# Altium footprint library 1.10-电容.PcbLib: 193 footprints (part 10 of 13)
Each footprint in its own frame and in the unit in brackets; x right, y up, seen from the top. Pads: shape width x height; smd on the part's side, far side on the other; paste and mask are expansions set on the pad; w line width, h text height; cw(c..) or ccw(c..) is an arc to the next point about the centre after c.
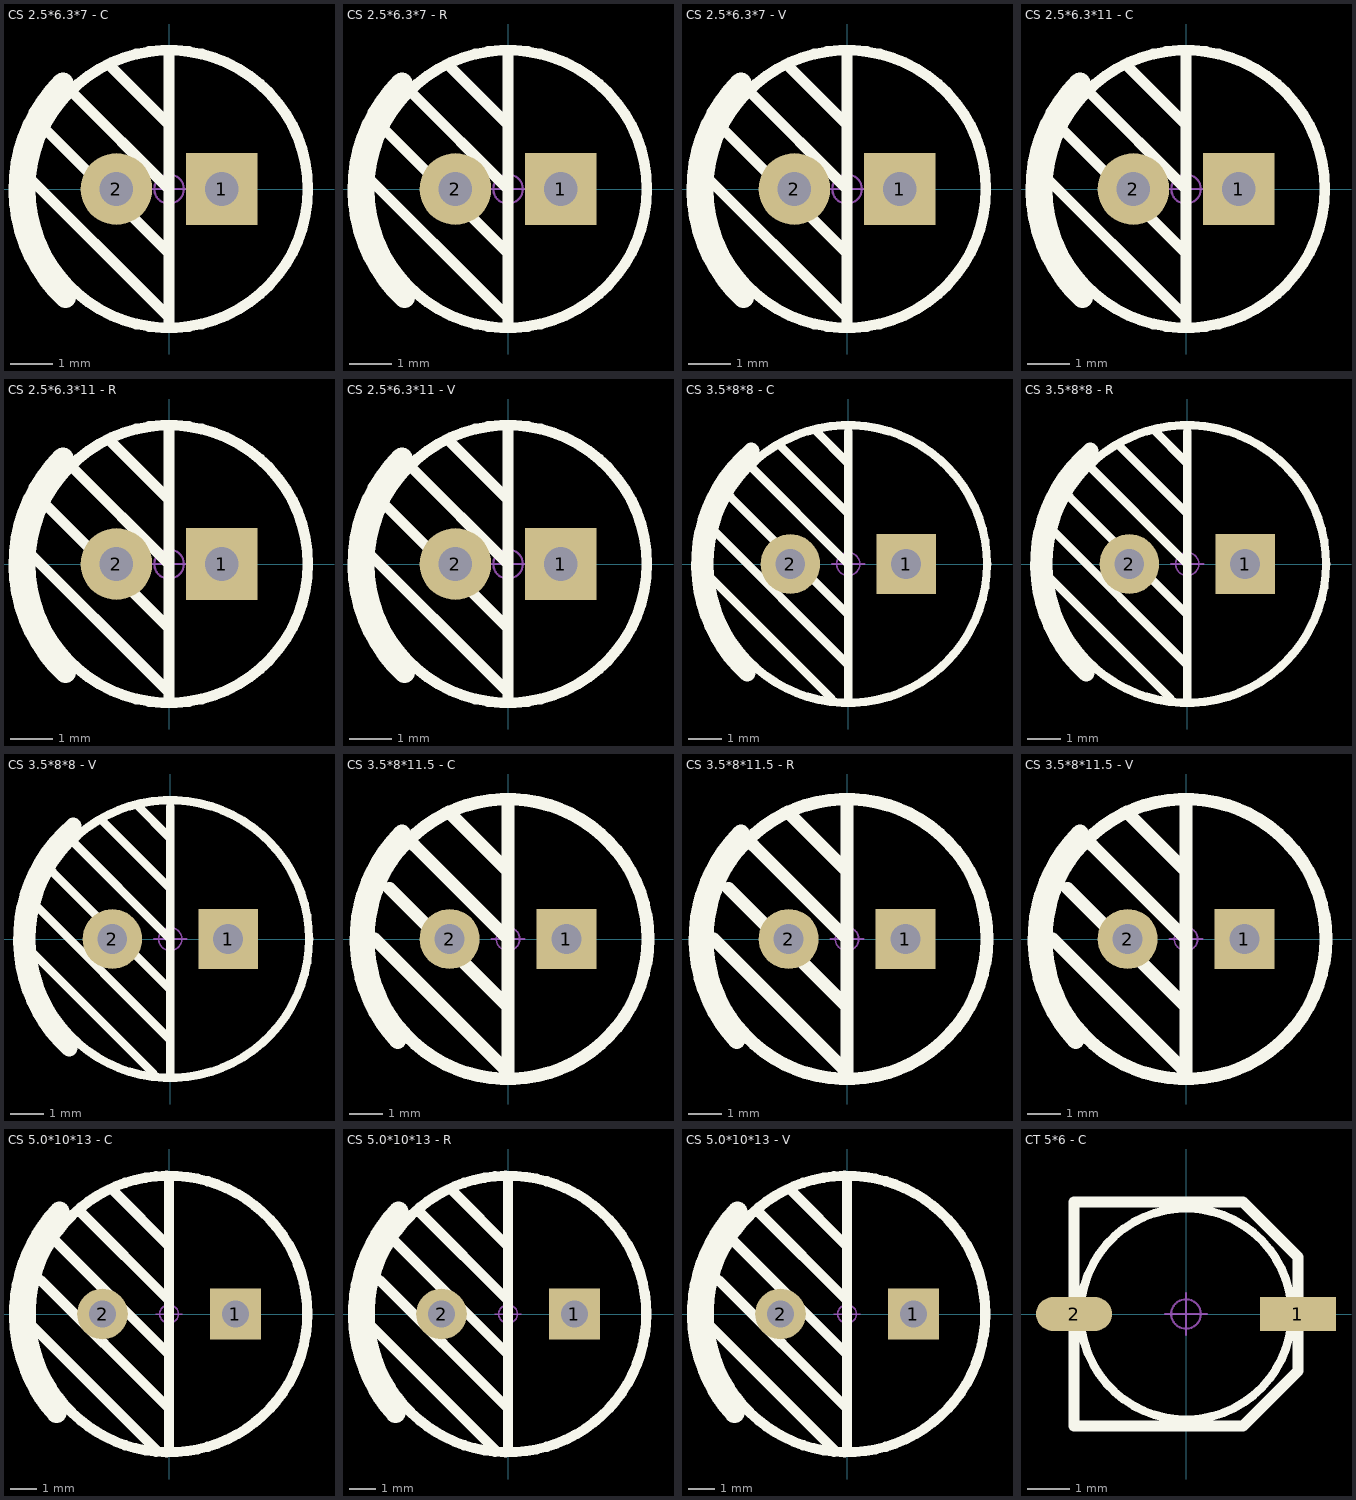
[diagram p9: the footprints below, top view; thin cyan lines are the x and y axes]

## CS 2.5*6.3*7 - C [mm] "脚距2.5mm , 直径6.3mm , 高7mm                淘宝ID:黄晶宝石"
pads (2):
  rect 1.7x1.7 hole 0.8: 1(1.25,0)
  round 1.7 hole 0.8: 2(-1.25,0)
Top Overlay:
  circle w0.254: c0,0 r3.3
  lines w0.254: -3.556,0.508 0,-3.048 ; -3.048,1.524 0,-1.524 ; -2.286,2.286 0,0 ; -1.397,2.921 0,1.524 ; 0,-3.15 0,3.15
  lines w0.504: -2.521,2.521 ccw(c0,0) -2.459,-2.582
Mechanical 15:
  circle w0.05: c0,0 r0.35
  lines w0.05: -0.5,0 0.5,0 ; 0,-0.5 0,0.5
3D body "CS 6.3X7.STEP": height 7.02, standoff -3.48, extent -3.15,-3.15 3.15,3.15

## CS 2.5*6.3*7 - R [mm] "脚距2.5mm , 直径6.3mm , 高7mm           淘宝ID:黄晶宝石"
pads (2):
  rect 1.7x1.7 hole 0.8: 1(1.25,0)
  round 1.7 hole 0.8: 2(-1.25,0)
Top Overlay:
  circle w0.254: c0,0 r3.3
  lines w0.254: -3.556,0.508 0,-3.048 ; -3.048,1.524 0,-1.524 ; -2.286,2.286 0,0 ; -1.397,2.921 0,1.524 ; 0,-3.15 0,3.15
  lines w0.504: -2.521,2.521 ccw(c0,0) -2.459,-2.582
Mechanical 15:
  circle w0.05: c0,0 r0.35
  lines w0.05: -0.5,0 0.5,0 ; 0,-0.5 0,0.5
3D body "CS 6.3X7.STEP": height 7.02, standoff -3.48, extent -3.15,-3.15 3.15,3.15

## CS 2.5*6.3*7 - V [mm] "脚距2.5mm , 直径6.3mm , 高7mm"
pads (2):
  rect 1.7x1.7 hole 0.8: 1(1.25,0)
  round 1.7 hole 0.8: 2(-1.25,0)
Top Overlay:
  circle w0.254: c0,0 r3.3
  lines w0.254: -3.556,0.508 0,-3.048 ; -3.048,1.524 0,-1.524 ; -2.286,2.286 0,0 ; -1.397,2.921 0,1.524 ; 0,-3.15 0,3.15
  lines w0.504: -2.521,2.521 ccw(c0,0) -2.459,-2.582
Mechanical 15:
  circle w0.05: c0,0 r0.35
  lines w0.05: -0.5,0 0.5,0 ; 0,-0.5 0,0.5
3D body "CS 6.3X7.STEP": height 7, standoff -3.5, extent -3.15,-3.15 3.15,3.15

## CS 2.5*6.3*11 - C [mm] "脚距2.5mm , 直径6.3mm , 高11mm                  淘宝ID:黄晶宝石"
pads (2):
  rect 1.7x1.7 hole 0.8: 1(1.25,0)
  round 1.7 hole 0.8: 2(-1.25,0)
Top Overlay:
  circle w0.254: c0,0 r3.3
  lines w0.254: -3.556,0.508 0,-3.048 ; -3.048,1.524 0,-1.524 ; -2.286,2.286 0,0 ; -1.397,2.921 0,1.524 ; 0,-3.15 0,3.15
  lines w0.504: -2.521,2.521 ccw(c0,0) -2.459,-2.582
Mechanical 15:
  circle w0.05: c0,0 r0.35
  lines w0.05: -0.5,0 0.5,0 ; 0,-0.5 0,0.5
3D body "CS 6.3X11.STEP": height 11.02, standoff -3.48, extent -3.15,-3.15 3.15,3.15

## CS 2.5*6.3*11 - R [mm] "脚距2.5mm , 直径6.3mm , 高11mm            淘宝ID:黄晶宝石"
pads (2):
  rect 1.7x1.7 hole 0.8: 1(1.25,0)
  round 1.7 hole 0.8: 2(-1.25,0)
Top Overlay:
  circle w0.254: c0,0 r3.3
  lines w0.254: -3.556,0.508 0,-3.048 ; -3.048,1.524 0,-1.524 ; -2.286,2.286 0,0 ; -1.397,2.921 0,1.524 ; 0,-3.15 0,3.15
  lines w0.504: -2.521,2.521 ccw(c0,0) -2.459,-2.582
Mechanical 15:
  circle w0.05: c0,0 r0.35
  lines w0.05: -0.5,0 0.5,0 ; 0,-0.5 0,0.5
3D body "CS 6.3X11.STEP": height 11.02, standoff -3.48, extent -3.15,-3.15 3.15,3.15

## CS 2.5*6.3*11 - V [mm] "脚距2.5mm , 直径6.3mm , 高11mm                   淘宝ID:黄晶宝石"
pads (2):
  rect 1.7x1.7 hole 0.8: 1(1.25,0)
  round 1.7 hole 0.8: 2(-1.25,0)
Top Overlay:
  circle w0.254: c0,0 r3.3
  lines w0.254: -3.556,0.508 0,-3.048 ; -3.048,1.524 0,-1.524 ; -2.286,2.286 0,0 ; -1.397,2.921 0,1.524 ; 0,-3.15 0,3.15
  lines w0.504: -2.521,2.521 ccw(c0,0) -2.459,-2.582
Mechanical 15:
  circle w0.05: c0,0 r0.35
  lines w0.05: -0.5,0 0.5,0 ; 0,-0.5 0,0.5
3D body "CS 6.3X11.STEP": height 11.02, standoff -3.48, extent -3.15,-3.15 3.15,3.15

## CS 3.5*8*8 - C [mm] "脚距3.5mm , 直径8mm , 高8mm"
pads (2):
  rect 1.8x1.8 hole 0.9: 1(1.75,0)
  round 1.8 hole 0.9: 2(-1.75,0)
Top Overlay:
  circle w0.254: c0,0 r4.2
  lines w0.254: -4.572,0 -0.508,-4.064 ; -4.064,1.016 0,-3.048 ; -3.556,2.032 0,-1.524 ; -3.048,3.048 0,0 ; -2.032,3.556 0,1.524 ; -1.016,4.064 0,3.048 ; 0,-4.191 0,4
  lines w0.504: -3.053,-3.307 cw(c0,0) -2.929,3.417
Mechanical 15:
  circle w0.05: c0,0 r0.35
  lines w0.05: -0.5,0 0.5,0 ; 0,-0.5 0,0.5
3D body "CS 8X8.STEP": height 8.02, standoff -3.48, extent -4,-4 4,4

## CS 3.5*8*8 - R [mm] "脚距3.5mm , 直径8mm , 高8mm"
pads (2):
  rect 1.8x1.8 hole 0.9: 1(1.75,0)
  round 1.8 hole 0.9: 2(-1.75,0)
Top Overlay:
  circle w0.254: c0,0 r4.2
  lines w0.254: -4.572,0 -0.508,-4.064 ; -4.064,1.016 0,-3.048 ; -3.556,2.032 0,-1.524 ; -3.048,3.048 0,0 ; -2.032,3.556 0,1.524 ; -1.016,4.064 0,3.048 ; 0,-4.191 0,4
  lines w0.504: -3.053,-3.307 cw(c0,0) -2.929,3.417
Mechanical 15:
  circle w0.05: c0,0 r0.35
  lines w0.05: -0.5,0 0.5,0 ; 0,-0.5 0,0.5
3D body "CS 8X8.STEP": height 8.02, standoff -3.48, extent -4,-4 4,4

## CS 3.5*8*8 - V [mm] "脚距3.5mm , 直径8mm , 高8mm"
pads (2):
  rect 1.8x1.8 hole 0.9: 1(1.75,0)
  round 1.8 hole 0.9: 2(-1.75,0)
Top Overlay:
  circle w0.254: c0,0 r4.2
  lines w0.254: -4.572,0 -0.508,-4.064 ; -4.064,1.016 0,-3.048 ; -3.556,2.032 0,-1.524 ; -3.048,3.048 0,0 ; -2.032,3.556 0,1.524 ; -1.016,4.064 0,3.048 ; 0,-4.191 0,4
  lines w0.504: -3.053,-3.307 cw(c0,0) -2.929,3.417
Mechanical 15:
  circle w0.05: c0,0 r0.35
  lines w0.05: -0.5,0 0.5,0 ; 0,-0.5 0,0.5
3D body "CS 8X8.STEP": height 8.02, standoff -3.48, extent -4,-4 4,4

## CS 3.5*8*11.5 - C [mm] "脚距3.5mm , 直径8mm , 高11.5mm"
pads (2):
  rect 1.8x1.8 hole 0.9: 1(1.75,0)
  round 1.8 hole 0.9: 2(-1.75,0)
Top Overlay:
  circle w0.381: c0,0 r4.2
  lines w0.381: -4,0 0,-4 0,4 ; -3.556,1.524 0,-2.032 ; -2.807,2.807 0,0 ; -1.778,3.81 0,2.032
  lines w0.504: -3.307,-3.053 cw(c0,0) -3.183,3.183
Mechanical 15:
  circle w0.05: c0,0 r0.35
  lines w0.05: -0.5,0 0.5,0 ; 0,-0.5 0,0.5
3D body "CS 8X11.5.STEP": height 11.52, standoff -3.48, extent -4,-4 4,4

## CS 3.5*8*11.5 - R [mm] "脚距3.5mm , 直径8mm , 高11.5mm"
pads (2):
  rect 1.8x1.8 hole 0.9: 1(1.75,0)
  round 1.8 hole 0.9: 2(-1.75,0)
Top Overlay:
  circle w0.381: c0,0 r4.2
  lines w0.381: -4,0 0,-4 0,4 ; -3.556,1.524 0,-2.032 ; -2.807,2.807 0,0 ; -1.778,3.81 0,2.032
  lines w0.504: -3.307,-3.053 cw(c0,0) -3.183,3.183
Mechanical 15:
  circle w0.05: c0,0 r0.35
  lines w0.05: -0.5,0 0.5,0 ; 0,-0.5 0,0.5
3D body "CS 8X11.5.STEP": height 11.52, standoff -3.48, extent -4,-4 4,4

## CS 3.5*8*11.5 - V [mm] "脚距3.5mm , 直径8mm , 高11.5mm            淘宝ID:黄晶宝石"
pads (2):
  rect 1.8x1.8 hole 0.9: 1(1.75,0)
  round 1.8 hole 0.9: 2(-1.75,0)
Top Overlay:
  circle w0.381: c0,0 r4.2
  lines w0.381: -4,0 0,-4 0,4 ; -3.556,1.524 0,-2.032 ; -2.807,2.807 0,0 ; -1.778,3.81 0,2.032
  lines w0.504: -3.307,-3.053 cw(c0,0) -3.183,3.183
Mechanical 15:
  circle w0.05: c0,0 r0.35
  lines w0.05: -0.5,0 0.5,0 ; 0,-0.5 0,0.5
3D body "CS 8X11.5.STEP": height 11.52, standoff -3.48, extent -4,-4 4,4

## CS 5.0*10*13 - C [mm] "脚距5mm , 直径10mm , 高13mm                   淘宝ID:黄晶宝石"
pads (2):
  rect 1.9x1.9 hole 1: 1(2.5,0)
  round 1.9 hole 1: 2(-2.5,0)
Top Overlay:
  circle w0.381: c0,0 r5.2
  lines w0.381: -5.08,-0.508 -0.508,-5.08 ; -5.08,1.27 -4.826,1.27 0,-3.556 ; -4.318,2.794 0,-1.524 ; -3.302,3.81 0,0.508 0,1.016 ; -2.032,4.572 0,2.54 ; 0,-5 0,5
  lines w0.75: -4.229,-3.731 cw(c0,0) -4.114,3.857
Mechanical 15:
  circle w0.05: c0,0 r0.35
  lines w0.05: -0.5,0 0.5,0 ; 0,-0.5 0,0.5
3D body "CS 10X13.STEP": height 13.02, standoff -3.48, extent -5,-5 5,5

## CS 5.0*10*13 - R [mm] "脚距5mm , 直径10mm , 高13mm"
pads (2):
  rect 1.9x1.9 hole 1: 1(2.5,0)
  round 1.9 hole 1: 2(-2.5,0)
Top Overlay:
  circle w0.381: c0,0 r5.2
  lines w0.381: -5.08,-0.508 -0.508,-5.08 ; -5.08,1.27 -4.826,1.27 0,-3.556 ; -4.318,2.794 0,-1.524 ; -3.302,3.81 0,0.508 0,1.016 ; -2.032,4.572 0,2.54 ; 0,-5 0,5
  lines w0.75: -4.229,-3.731 cw(c0,0) -4.114,3.857
Mechanical 15:
  circle w0.05: c0,0 r0.35
  lines w0.05: -0.5,0 0.5,0 ; 0,-0.5 0,0.5
3D body "CS 10X13.STEP": height 13.02, standoff -3.48, extent -5,-5 5,5

## CS 5.0*10*13 - V [mm] "脚距5mm , 直径10mm , 高13mm                  淘宝ID:黄晶宝石"
pads (2):
  rect 1.9x1.9 hole 1: 1(2.5,0)
  round 1.9 hole 1: 2(-2.5,0)
Top Overlay:
  circle w0.381: c0,0 r5.2
  lines w0.381: -5.08,-0.508 -0.508,-5.08 ; -5.08,1.27 -4.826,1.27 0,-3.556 ; -4.318,2.794 0,-1.524 ; -3.302,3.81 0,0.508 0,1.016 ; -2.032,4.572 0,2.54 ; 0,-5 0,5
  lines w0.75: -4.229,-3.731 cw(c0,0) -4.114,3.857
Mechanical 15:
  circle w0.05: c0,0 r0.35
  lines w0.05: -0.5,0 0.5,0 ; 0,-0.5 0,0.5
3D body "CS 10X13.STEP": height 13.02, standoff -3.48, extent -5,-5 5,5

## CT 5*6 - C [mm] "直径5mm，高6mm                           淘宝ID:黄晶宝石"
pads (2):
  rect 1.8x0.8 smd: 1(2.65,0)
  oval 1.8x0.8 smd: 2(-2.65,0)
Top Overlay:
  circle w0.2: c0,0 r2.5
  lines w0.254: -2.65,-2.65 1.35,-2.65 2.65,-1.35 2.65,1.35 1.35,2.65 -2.65,2.65 -2.65,-2.65
Mechanical 15:
  circle w0.05: c0,0 r0.35
  lines w0.05: -0.5,0 0.5,0 ; 0,-0.5 0,0.5
3D body "CT 5X6-C.STEP": height 6, standoff -0.01, extent -2.95,-2.65 2.95,2.65